# Altium schematic symbol library 1932588.SchLib: 2 symbols
Pins are listed as number, name and electrical type; pins without a type are passive.

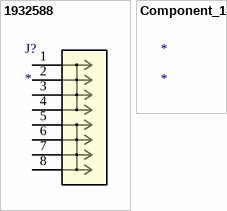
[diagram p0: symbols 1932588 to Component_1]

## 1932588
designator J?
No Description Available; Mfr_Name: Phoenix Contact; RefDes: RefDes; Type: Type
footprint CONN_1932588
pins: 1, 2, 3, 4, 5, 6, 7, 8

## Component_1
designator *